# Altium footprint library SH_S.PcbLib: 8 footprints
Each footprint in its own frame and in the unit in brackets; x right, y up, seen from the top. Pads: shape width x height; smd on the part's side, far side on the other; paste and mask are expansions set on the pad; w line width, h text height; cw(c..) or ccw(c..) is an arc to the next point about the centre after c.
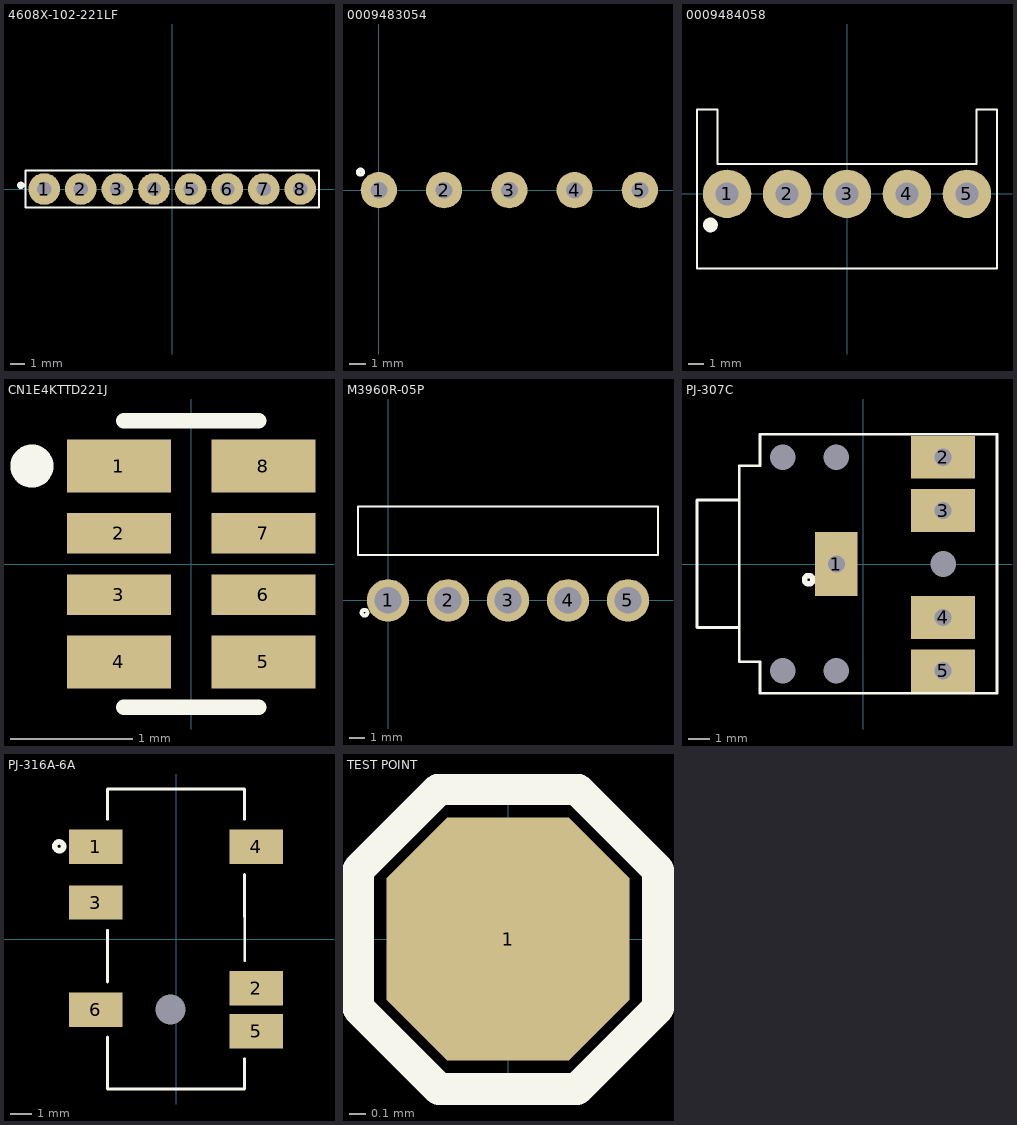
[diagram p0: the footprints below, top view; thin cyan lines are the x and y axes]

## 4608X-102-221LF [mm]
pads (8):
  round 2.2 hole 1: 1(-8.89,0) 2(-6.35,0) 3(-3.81,0) 4(-1.27,0) 5(1.27,0) 6(3.81,0) 7(6.35,0) 8(8.89,0)
Top Overlay:
  circle w0.254: c-10.516,0.254 r0.127
  lines w0.127: -10.185,-1.295 -10.185,1.295 10.185,1.295 10.185,-1.295 -10.185,-1.295
3D body "4608x-104-221_331l.stp": height 4.35, standoff -4.04, extent -10.135,-1.245 10.135,1.245

## 0009483054 [mm]
pads (5):
  round 2.2 hole 1.02: 1(0,0) 2(3.96,0) 3(7.92,0) 4(11.88,0) 5(15.84,0)
Top Overlay:
  circle w0.254: c-1.118,1.092 r0.148
3D body "009483054.stp": height 11.63, standoff -2.98, extent -1.905,-6.502 17.805,5.385

## 0009484058 [mm]
pads (5):
  round 3.2 hole 1.52: 1(-7.92,0) 2(-3.96,0) 3(0,0) 4(3.96,0) 5(7.92,0)
Top Overlay:
  circle w0.5: c-9.017,-2.057 r0.234
  lines w0.127: -9.906,-4.928 9.906,-4.928 9.906,5.563 8.56,5.563 8.56,1.956 -8.56,1.956 -8.56,5.563 -9.906,5.563 -9.906,-4.928
3D body "009484058.stp": height 11.5, standoff -2.98, extent -9.855,-6.35 9.855,5.53

## CN1E4KTTD221J [mm]
pads (8):
  rect 0.85x0.43 smd: 1(-0.59,0.8) 4(-0.59,-0.8) 5(0.59,-0.8) 8(0.59,0.8)
  rect 0.85x0.33 smd: 2(-0.59,0.25) 3(-0.59,-0.25) 6(0.59,-0.25) 7(0.59,0.25)
Top Overlay:
  circle w0.2: c-1.301,0.8 r0.076
  lines w0.127: -0.55,-1.17 0.55,-1.17 ; -0.55,1.17 0.55,1.17
3D body "cay10-560j4lf.stp": height 0.33, standoff -0.02, extent -0.517,-1 0.483,1

## M3960R-05P [mm]
pads (5):
  round 2.8 hole 1.75: 1(0,0) 2(3.96,0) 3(7.92,0) 4(11.88,0) 5(15.84,0)
Top Overlay:
  circle w0.254: c-1.549,-0.813 r0.193
  lines w0.127: -1.98,3 -1.98,6.2 17.82,6.2 17.82,3 -1.98,3

## PJ-307C [mm]
pads (10):
  rect 2x3 hole 0.8 square: 1(-1.25,0)
  rect 3x2 hole 0.8 square: 2(3.75,5) 3(3.75,2.5) 4(3.75,-2.5) 5(3.75,-5)
  round 0 hole 1.2 unplated: MH1(-3.75,5) MH2(-1.25,5) MH3(-3.75,-5) MH4(-1.25,-5) MH5(3.75,0)
Top Overlay:
  circle w0.254: c-2.54,-0.737 r0.198
  lines w0.127: -5.791,-2.972 -5.791,-4.572 -4.826,-4.572 -4.826,-6.045 6.274,-6.045 6.274,6.071 -4.826,6.071 -4.826,4.597 -5.791,4.597 -5.791,2.997 ; -5.791,-2.972 -7.772,-2.972 -7.772,2.997 -5.791,2.997 ; -5.791,-2.972 -5.791,2.997
3D body "pj-307.step": height 5.5, standoff -3.2, extent -7.762,-5.98 6.238,6.02

## PJ-316A-6A [mm]
pads (7):
  rect 2.5x1.6 smd: 1(-3.75,4.3) 2(3.75,-2.3) 3(-3.75,1.7) 4(3.75,4.3) 5(3.75,-4.3) 6(-3.75,-3.3)
  round 0 hole 1.4 unplated: 7(-0.25,-3.3)
Top Overlay:
  circle w0.254: c-5.452,4.325 r0.205
  lines w0.127: -3.2,-4.572 -3.2,-7 0,-7 3.2,-7 3.2,-5.588 ; -3.2,-2.007 -3.2,0.412 ; -3.2,5.588 -3.2,7 0,7 3.2,7 3.2,5.588 ; 3.2,-1.016 3.2,3.012

## TEST POINT [mil]
pads (1):
  oct 60x60 smd: 1(0,0)
Top Overlay:
  lines w7.87: -17,-37 17,-37 ; -17,-37 -37,-17 -37,17 -17,37 ; -17,-37 17,-37 ; -17,37 17,37 ; -17,37 17,37 ; 17,-37 37,-17 37,17 17,37